# Altium footprint library FootPrintLib_3.PcbLib: 198 footprints (part 2 of 13)
Each footprint in its own frame and in the unit in brackets; x right, y up, seen from the top. Pads: shape width x height; smd on the part's side, far side on the other; paste and mask are expansions set on the pad; w line width, h text height; cw(c..) or ccw(c..) is an arc to the next point about the centre after c.
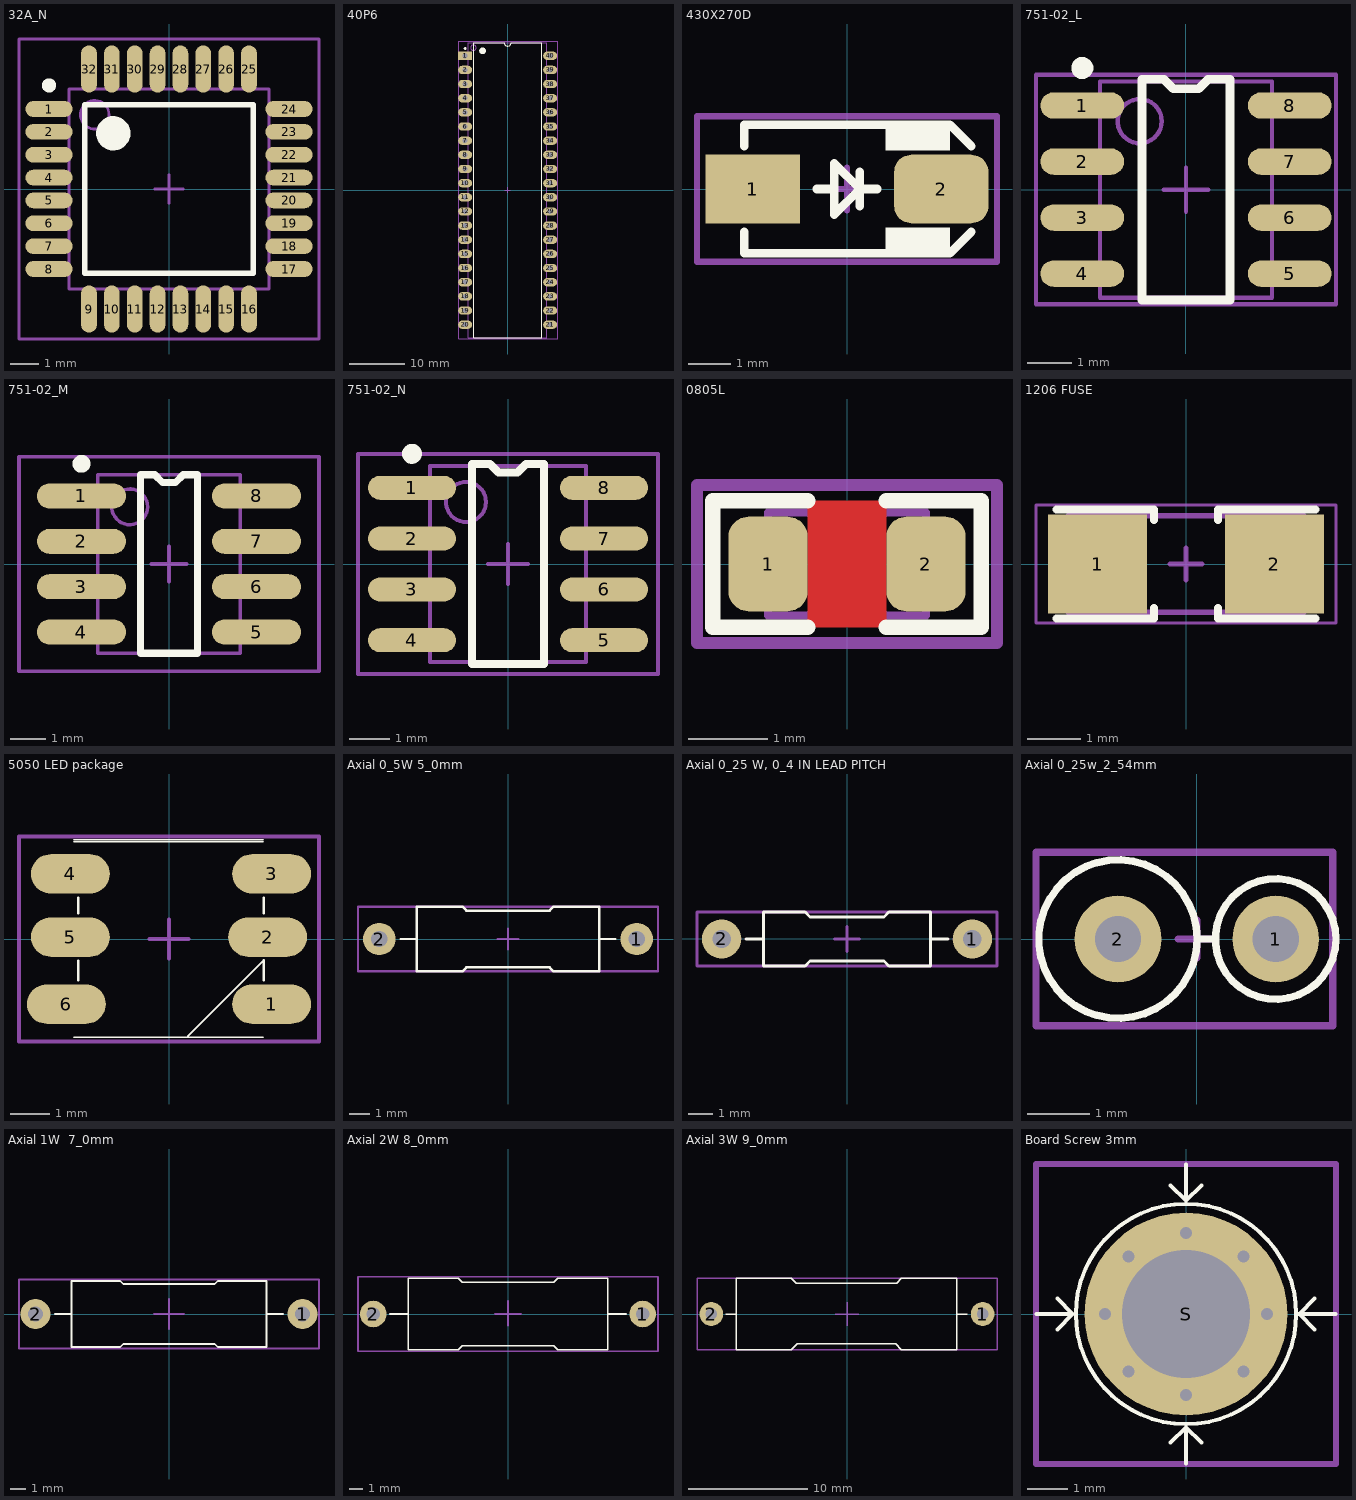
[diagram p1: the footprints below, top view; thin cyan lines are the x and y axes]

## 32A_N [mm] "Thin QFP, 32-Leads, Body 7x7mm, Pitch 0.8mm, IPC Medium Density"
height 1.2
pads (32):
  oval 1.65x0.55 smd mask+0.06: 1(-4.2,2.8) 2(-4.2,2) 3(-4.2,1.2) 4(-4.2,0.4) 5(-4.2,-0.4) 6(-4.2,-1.2) 7(-4.2,-2) 8(-4.2,-2.8) 17(4.2,-2.8) 18(4.2,-2) 19(4.2,-1.2) 20(4.2,-0.4) 21(4.2,0.4) 22(4.2,1.2) 23(4.2,2) 24(4.2,2.8)
  oval 0.55x1.65 smd mask+0.06: 9(-2.8,-4.2) 10(-2,-4.2) 11(-1.2,-4.2) 12(-0.4,-4.2) 13(0.4,-4.2) 14(1.2,-4.2) 15(2,-4.2) 16(2.8,-4.2) 25(2.8,4.2) 26(2,4.2) 27(1.2,4.2) 28(0.4,4.2) 29(-0.4,4.2) 30(-1.2,4.2) 31(-2,4.2) 32(-2.8,4.2)
Top Overlay:
  circle w0.6: c-1.95,1.95 r0.3
  circle w0.25: c-4.2,3.625 r0.125
  lines w0.2: -2.95,-2.95 2.95,-2.95 2.95,2.95 -2.95,2.95 -2.95,-2.95
Mechanical 13:
  circle w0.1: c-2.6,2.6 r0.5
  lines w0.1: -3.5,-3.5 3.5,-3.5 3.5,3.5 -3.5,3.5 -3.5,-3.5
Mechanical 15:
  lines w0.1: -0.5,0 0.5,0 ; 0,-0.5 0,0.5 ; -5.25,-5.25 5.25,-5.25 5.25,5.25 -5.25,5.25 -5.25,-5.25
3D body "User Library-Atmel Atmega 48p Case 32A.STEP": height 1.15, standoff -0.05, extent -4.506,-4.506 4.506,4.506

## 40P6 [mm] "DIP, 40-Leads, Row Spacing 15.24mm, Pitch 2.54mm, Body 52.2x13.95mm"
height 4.83
pads (40):
  rect 2.5x1.5 hole 0.9: 1(-7.62,24.13)
  oval 2.5x1.5 hole 0.9: 2(-7.62,21.59) 3(-7.62,19.05) 4(-7.62,16.51) 5(-7.62,13.97) 6(-7.62,11.43) 7(-7.62,8.89) 8(-7.62,6.35) 9(-7.62,3.81) 10(-7.62,1.27) 11(-7.62,-1.27) 12(-7.62,-3.81) 13(-7.62,-6.35) 14(-7.62,-8.89) 15(-7.62,-11.43) 16(-7.62,-13.97) 17(-7.62,-16.51) 18(-7.62,-19.05) 19(-7.62,-21.59) 20(-7.62,-24.13) 21(7.62,-24.13) 22(7.62,-21.59) 23(7.62,-19.05) 24(7.62,-16.51) 25(7.62,-13.97) 26(7.62,-11.43) 27(7.62,-8.89) 28(7.62,-6.35) 29(7.62,-3.81) 30(7.62,-1.27) 31(7.62,1.27) 32(7.62,3.81) 33(7.62,6.35) 34(7.62,8.89) 35(7.62,11.43) 36(7.62,13.97) 37(7.62,16.51) 38(7.62,19.05) 39(7.62,21.59) 40(7.62,24.13)
Top Overlay:
  circle w0.6: c-4.5,25 r0.3
  circle w0.25: c-7.62,25.43 r0.125
  lines w0.2: -6.1,-26.5 6.1,-26.5 6.1,26.5 0.635,26.5 cw(c0,26.5) -0.635,26.5 -6.1,26.5 -6.1,-26.5
Mechanical 13:
  circle w0.1: c-6.15,25.575 r0.5
  lines w0.1: -7.05,-26.475 7.05,-26.475 7.05,26.475 -7.05,26.475 -7.05,-26.475
Mechanical 15:
  lines w0.1: -0.5,0 0.5,0 ; 0,-0.5 0,0.5
  lines w0.15: -8.8,-26.7 -8.8,26.7 9,26.7 9,-26.7 -8.8,-26.7
3D body "User Library-DIP40-600-with-chip-Type2.STEP": height 7.89, standoff -3.27, extent -8.7,-26.13 8.9,26.13

## 430X270D [mm] "SMA Molded Diode, 2-Leads, Body 4.3x2.7mm"
height 2.4
pads (2):
  rect 2.2x1.6 smd: 1(-2.2,0)
  rrect50% 2.2x1.6 smd: 2(2.2,0)
Top Overlay:
  rectangle: 0.9,0.9 2.4,1.5
  rectangle: 0.9,-1.5 2.4,-0.9
  lines w0.2: -2.4,-1 -2.4,-1.5 2.4,-1.5 2.9,-1 ; -2.4,1 -2.4,1.5 2.4,1.5 2.9,1 ; -0.7,0 -0.3,0 ; 0.3,-0.4 0.3,0.4 ; 0.7,0 0.3,0 ; 0.3,0 -0.3,-0.6 -0.3,0.6 0.3,0
Mechanical 15:
  lines w0.15: -0.5,0 0.5,0 ; 0,-0.5 0,0.5 ; -3.5,-1.7 -3.5,1.7 3.5,1.7 3.5,-1.7 -3.5,-1.7
3D body "User Library-DIOM5528X26.step": height 2.6, standoff 0.03, extent -2.75,-1.4 2.75,1.4

## 751-02_L [mm] "8-Pin Small Outline Integrated Circuit 1.27 mm Pitch, IPC High Density-DESIGNER ABBAS BASEREH"
height 1.75
pads (8):
  oval 1.9x0.6 smd: 1(-2.35,1.905) 2(-2.35,0.635) 3(-2.35,-0.635) 4(-2.35,-1.905) 5(2.35,-1.905) 6(2.35,-0.635) 7(2.35,0.635) 8(2.35,1.905)
Top Overlay:
  circle w0.25: c-2.35,2.755 r0.125
  lines w0.2: -1,-2.5 1,-2.5 1,2.5 0.5,2.5 0.286,2.286 -0.286,2.286 -0.5,2.5 -1,2.5 -1,-2.5
Mechanical 13:
  circle w0.1: c-1.05,1.55 r0.5
  lines w0.1: -1.95,-2.45 1.95,-2.45 1.95,2.45 -1.95,2.45 -1.95,-2.45
Mechanical 15:
  lines w0.1: -0.5,0 0.5,0 ; 0,-0.5 0,0.5 ; -3.4,-2.6 3.4,-2.6 3.4,2.6 -3.4,2.6 -3.4,-2.6
3D body "User Library-SO-8N.STEP": height 1.62, standoff 0, extent -3,-2.46 3,2.46

## 751-02_M [mm] "8-Pin Small Outline Integrated Circuit 1.27 mm Pitch, IPC Low Density-DESIGNER ABBAS BASEREH"
height 1.75
pads (8):
  oval 2.5x0.7 smd: 1(-2.45,1.905) 2(-2.45,0.635) 3(-2.45,-0.635) 4(-2.45,-1.905) 5(2.45,-1.905) 6(2.45,-0.635) 7(2.45,0.635) 8(2.45,1.905)
Top Overlay:
  circle w0.25: c-2.45,2.805 r0.125
  lines w0.2: -0.8,-2.5 -0.8,2.5 -0.4,2.5 -0.186,2.286 0.186,2.286 0.4,2.5 0.8,2.5 0.8,-2.5 -0.8,-2.5
Mechanical 13:
  circle w0.1: c-1.1,1.6 r0.5
  lines w0.1: -2,-2.5 -2,2.5 2,2.5 2,-2.5 -2,-2.5
Mechanical 15:
  lines w0.1: -0.5,0 0.5,0 ; 0,-0.5 0,0.5 ; -4.2,-3 -4.2,3 4.2,3 4.2,-3 -4.2,-3
3D body "User Library-SO-8N.STEP": height 1.62, standoff 0, extent -3,-2.46 3,2.46

## 751-02_N [mm] "8-Pin Small Outline Integrated Circuit 1.27 mm Pitch, IPC Medium Density-DESIGNER ABBAS BASEREH"
height 1.75
pads (8):
  oval 2.2x0.6 smd: 1(-2.4,1.905) 2(-2.4,0.635) 3(-2.4,-0.635) 4(-2.4,-1.905) 5(2.4,-1.905) 6(2.4,-0.635) 7(2.4,0.635) 8(2.4,1.905)
Top Overlay:
  circle w0.25: c-2.4,2.755 r0.125
  lines w0.2: -0.9,-2.5 0.9,-2.5 0.9,2.5 0.45,2.5 0.236,2.286 -0.236,2.286 -0.45,2.5 -0.9,2.5 -0.9,-2.5
Mechanical 13:
  circle w0.1: c-1.05,1.55 r0.5
  lines w0.1: -1.95,-2.45 1.95,-2.45 1.95,2.45 -1.95,2.45 -1.95,-2.45
Mechanical 15:
  lines w0.1: -0.5,0 0.5,0 ; 0,-0.5 0,0.5 ; -3.75,-2.75 3.75,-2.75 3.75,2.75 -3.75,2.75 -3.75,-2.75
3D body "User Library-SO-8N.STEP": height 1.62, standoff 0, extent -3,-2.46 3,2.46

## 0805L [mm] ",0805, 2012, 200X130"
height 7.62
pads (2):
  rrect50% 1x1.2 smd mask+0.075: 1(-1,0) 2(1,0)
Top Layer:
  pour cut-out: -0.5,0.8 0.5,0.8 0.5,-0.8 -0.5,-0.8
Top Overlay:
  lines w0.2: -0.5,-0.8 -1.7,-0.8 -1.7,0.8 -0.5,0.8 ; 0.5,-0.8 1.7,-0.8 1.7,0.8 0.5,0.8
Mechanical 13:
  lines w0.1: -1,-0.65 -1,0.65 1,0.65 1,-0.65 -1,-0.65
Mechanical 15:
  lines w0.15: -0.2,0 0.2,0 ; 0,-0.2 0,0.2 ; -1.9,-1 1.9,-1 1.9,1 -1.9,1 -1.9,-1
3D body "User Library-ind_0805.step": height 0.95, standoff 0, extent -1,-0.6 1,0.6

## 1206 FUSE [mm] "Fast Acting Smd 1206 non-Resettable Fuse Chip For Pcb Board-Design:Abbas Basereh"
height 1
pads (2):
  rect 1.85x1.85 smd: 1(-1.65,0) 2(1.65,0)
Top Overlay:
  lines w0.15: -2.413,-1.016 -0.6,-1.016 -0.6,-0.825 ; -2.413,1.016 -0.6,1.016 -0.6,0.825 ; 0.6,-0.825 0.6,-1.016 2.413,-1.016 ; 0.6,0.825 0.6,1.016 2.413,1.016
Mechanical 13:
  lines w0.1: -2.2,-0.9 2.2,-0.9 2.2,0.9 -2.2,0.9 -2.2,-0.9
Mechanical 15:
  lines w0.05: -2.8,-1.1 2.8,-1.1 2.8,1.1 -2.8,1.1 -2.8,-1.1
  lines w0.1: -0.3,0 0.3,0 ; 0,-0.3 0,0.3
3D body "User Library-FUSER_nanoSMD.STEP": height 1, standoff 0, extent -1.602,-0.8 1.603,0.8

## 5050 LED package [mm] "DESIGNER ABBAS BASEREH"
height 1.6
pads (6):
  oval 2x1 smd: 1(2.6,-1.65) 2(2.5,0.05) 3(2.6,1.65) 4(-2.5,1.65) 5(-2.5,0.05) 6(-2.6,-1.65)
Top Overlay:
  lines w0.04: -2.41,-2.486 1.691,-2.486 2.39,-2.486 ; -2.41,2.464 2.39,2.464 ; -2.41,2.514 2.39,2.514 ; 0.475,-2.461 2.4,-0.536
  lines w0.06: -2.3,-1.05 -2.3,-0.55 ; -2.3,0.65 -2.3,1.05 ; 2.4,-1.05 2.4,-0.536 ; 2.4,0.65 2.4,1.05
Mechanical 15:
  lines w0.1: -0.5,0 0.5,0 ; 0,-0.5 0,0.5 ; -3.8,-2.6 3.8,-2.6 3.8,2.6 -3.8,2.6 -3.8,-2.6
3D body "User Library-APA102C.STEP": height 1.55, standoff 0, extent -2.75,-2.5 2.75,2.5

## Axial 0_5W 5_0mm [mm] "Designer Abbas Basereh"
height 6
pads (2):
  round 1.6 hole 0.8: 1(6.35,0) 2(-6.35,0)
Top Overlay:
  lines w0.12: -5.3,0 -4.5,0 ; 4.5,0 5.3,0 ; -4.5,-1.6 -4.5,1.6 -2.25,1.6 -2.05,1.4 2.05,1.4 2.25,1.6 4.5,1.6 4.5,-1.6 2.25,-1.6 2.05,-1.4 -2.05,-1.4 -2.25,-1.6 -4.5,-1.6
Mechanical 15:
  lines w0.12: -0.5,0 0.5,0 ; 0,-0.5 0,0.5 ; -7.4,-1.6 -7.4,1.6 7.4,1.6 7.4,-1.6 -7.4,-1.6
3D body "User Library-Res50 0_5W SilCoat.STEP": height 4.02, standoff -1.3, extent -6.7,-1.65 6.7,1.65

## Axial 0_25 W, 0_4 IN LEAD PITCH [mm] "Designer Abbas Basereh"
height 5
pads (2):
  round 1.6 hole 0.75: 1(5.1,0) 2(-5.1,0)
Top Overlay:
  lines w0.12: -4.1,0 -3.4,0 ; 3.4,0 4.1,0 ; -3.4,-1.1 -1.7,-1.1 -1.5,-0.9 1.5,-0.9 1.7,-1.1 3.4,-1.1 3.4,1.1 1.7,1.1 1.5,0.9 -1.5,0.9 -1.7,1.1 -3.4,1.1 -3.4,-1.1
Mechanical 15:
  lines w0.12: -0.5,0 0.5,0 ; 0,-0.5 0,0.5 ; -6.1,-1.1 6.1,-1.1 6.1,1.1 -6.1,1.1 -6.1,-1.1
3D body "SW3dPS-RESISTOR, 0.25 W, 0.4 IN LEAD PITCH.STEP": height 3.63, standoff -1.84, extent -5.405,-1.156 5.365,1.156

## Axial 0_25w_2_54mm [mm] "Designer Abbas Basereh"
height 7
pads (2):
  round 1.4 hole 0.75: 1(1.275,0) 2(-1.275,0)
Top Overlay:
  circle w0.12: c1.275,0 r0.975
  circle w0.12: c-1.275,0 r1.281
  lines w0.12: 0.006,0 0.3,0
Mechanical 15:
  lines w0.12: -0.3,0 0.3,0 ; 0,-0.3 0,0.3 ; -2.6,-1.4 2.2,-1.4 2.2,1.4 -2.6,1.4 -2.6,-1.4
3D body "User Library-Resistor 0_25w_2_54mm.STEP": height 9.4, standoff -2, extent -2.475,-1.2 1.565,1.2

## Axial 1W  7_0mm [mm] "Designer Abbas Basereh"
height 7
pads (2):
  round 2 hole 1: 1(8.9,0) 2(-8.9,0)
Top Overlay:
  lines w0.12: -7.6,0 -6.5,0 ; 6.5,0 7.6,0 ; -6.5,-2.2 -3.25,-2.2 -3.05,-2 3.05,-2 3.25,-2.2 6.5,-2.2 6.5,2.2 3.25,2.2 3.05,2 -3.05,2 -3.25,2.2 -6.5,2.2 -6.5,-2.2
Mechanical 15:
  lines w0.12: -1,0 1,0 ; 0,-1 0,1 ; -10,-2.3 10,-2.3 10,2.3 -10,2.3 -10,-2.3
3D body "User Library-Res70 1W SilCoat.STEP": height 5.22, standoff -1.3, extent -9.265,-2.25 9.265,2.25

## Axial 2W 8_0mm [mm] "Designer Abbas Basereh"
height 8
pads (2):
  round 2 hole 1: 1(10.15,0) 2(-10.15,0)
Top Overlay:
  lines w0.12: -8.9,0 -7.5,0 ; 7.5,0 8.9,0 ; -7.5,-2.7 -7.5,2.7 -3.75,2.7 -3.45,2.4 3.45,2.4 3.75,2.7 7.5,2.7 7.5,-2.7 3.75,-2.7 3.45,-2.4 -3.45,-2.4 -3.75,-2.7 -7.5,-2.7
Mechanical 15:
  lines w0.12: -1,0 1,0 ; 0,-0.9 0,1 ; -11.3,-2.8 -11.3,2.8 11.3,2.8 11.3,-2.8 -11.3,-2.8
3D body "User Library-Res80 2W SilCoat.STEP": height 5.97, standoff -1.3, extent -10.565,-2.75 10.565,2.75

## Axial 3W 9_0mm [mm] "Designer Abbas Basereh"
height 9
pads (2):
  round 2 hole 1: 1(11.4,0) 2(-11.4,0)
Top Overlay:
  lines w0.12: -10.2,0 -9.3,0 ; 9.2,0 10.1,0 ; -9.3,-3 -9.3,3 -4.675,3 -4.275,2.6 4.175,2.6 4.575,3 9.2,3 9.2,-3 4.575,-3 4.075,-2.5 -4.175,-2.5 -4.675,-3 -9.3,-3
Mechanical 15:
  lines w0.12: -1,0 1,0 ; 0,-1 0,1 ; -12.6,-3 12.6,-3 12.6,3 -12.6,3 -12.6,-3
3D body "User Library-Res90 3W SilCoat.STEP": height 6.73, standoff -1.3, extent -11.835,-3.01 11.835,3.01

## Board Screw 3mm [mm]
pads (1):
  round 5 hole 3.15 mask+0.1: S(0,0)
via 0,2 diameter 0.5 hole 0.3
via 1.414,1.414 diameter 0.5 hole 0.3
via 2,0 diameter 0.5 hole 0.3
via 1.414,-1.414 diameter 0.5 hole 0.3
via 0,-2 diameter 0.5 hole 0.3
via -1.414,-1.414 diameter 0.5 hole 0.3
via -2,0 diameter 0.5 hole 0.3
via -1.414,1.414 diameter 0.5 hole 0.3
Top Overlay:
  circle w0.1: c0,0 r2.718
  lines w0.1: -3.683,0 -2.794,0 ; -3.175,-0.381 -2.794,0 ; -3.175,0.381 -2.794,0 ; -0.381,-3.175 0,-2.794 ; -0.381,3.175 0,2.794 ; 0,-3.683 0,-2.794 ; 0,3.683 0,2.794 ; 0.381,-3.175 0,-2.794 ; 0.381,3.175 0,2.794 ; 2.718,0 3.683,0 ; 3.175,-0.381 2.794,0 3.175,0.381
Mechanical 15:
  lines w0.15: -3.7,-3.7 -3.7,3.7 3.7,3.7 3.7,-3.7 -3.7,-3.7